# Altium footprint library GO_KART_CONTROLLER.PcbLib: 18 footprints (part 2 of 2)
Each footprint in its own frame and in the unit in brackets; x right, y up, seen from the top. Pads: shape width x height; smd on the part's side, far side on the other; paste and mask are expansions set on the pad; w line width, h text height; cw(c..) or ccw(c..) is an arc to the next point about the centre after c.
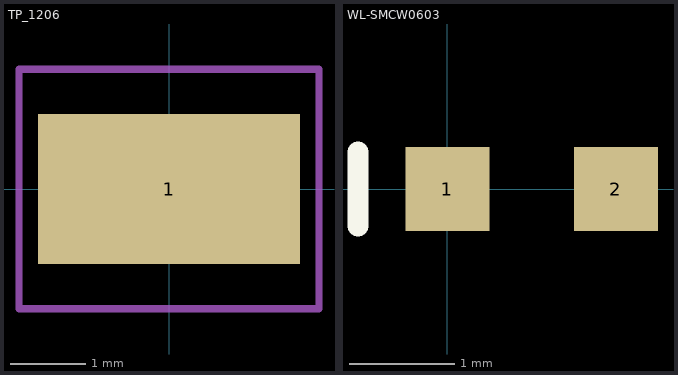
[diagram p1: the footprints below, top view; thin cyan lines are the x and y axes]

## TP_1206 [mm]
pads (1):
  rect 3.5x2 smd: 1(0,0)
Mechanical 15:
  lines w0.1: -2,-1.6 -2,1.6 2,1.6 2,-1.6 -2,-1.6
3D body "s1751-46r.stp": height 2, standoff -0.05, extent -1.62,-0.85 1.63,0.8

## WL-SMCW0603 [mm]
pads (2):
  rect 0.8x0.8 smd: 1(0,0) 2(1.6,0)
Top Overlay:
  lines w0.2: -0.85,-0.35 -0.85,0.35